# Altium integrated library SN74LVC1T45DBVR.IntLib: 1 symbol
Pins are listed as number, name and electrical type; pins without a type are passive.

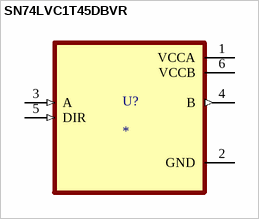
[diagram p0: symbol SN74LVC1T45DBVR]

## SN74LVC1T45DBVR
designator U?
Single-Bit Dual-Supply Bus Transceiver with Configurable Voltage-Level Shifting and 3-State Outputs; MF: Texas Instruments; MP: SN74LVC1T45DBVR; SnapEDA_Link: https://www.snapeda.com/parts/SN74LVC1T45DBVR/Texas+Instruments/view-part/?ref=snap; Package: SOT-23-6 Texas Instruments; Value: *; Check_prices: https://www.snapeda.com/parts/SN74LVC1T45DBVR/Texas+Instruments/view-part/?ref=eda
footprint SOT95P280X145-6N
pins: 1 VCCA (power), 2 GND (power), 3 A (in), 4 B (out), 5 DIR (in), 6 VCCB (power)